# Altium schematic symbol library SiPAP_Parts_v2.SchLib: 40 symbols
Pins are listed as number, name and electrical type; pins without a type are passive.

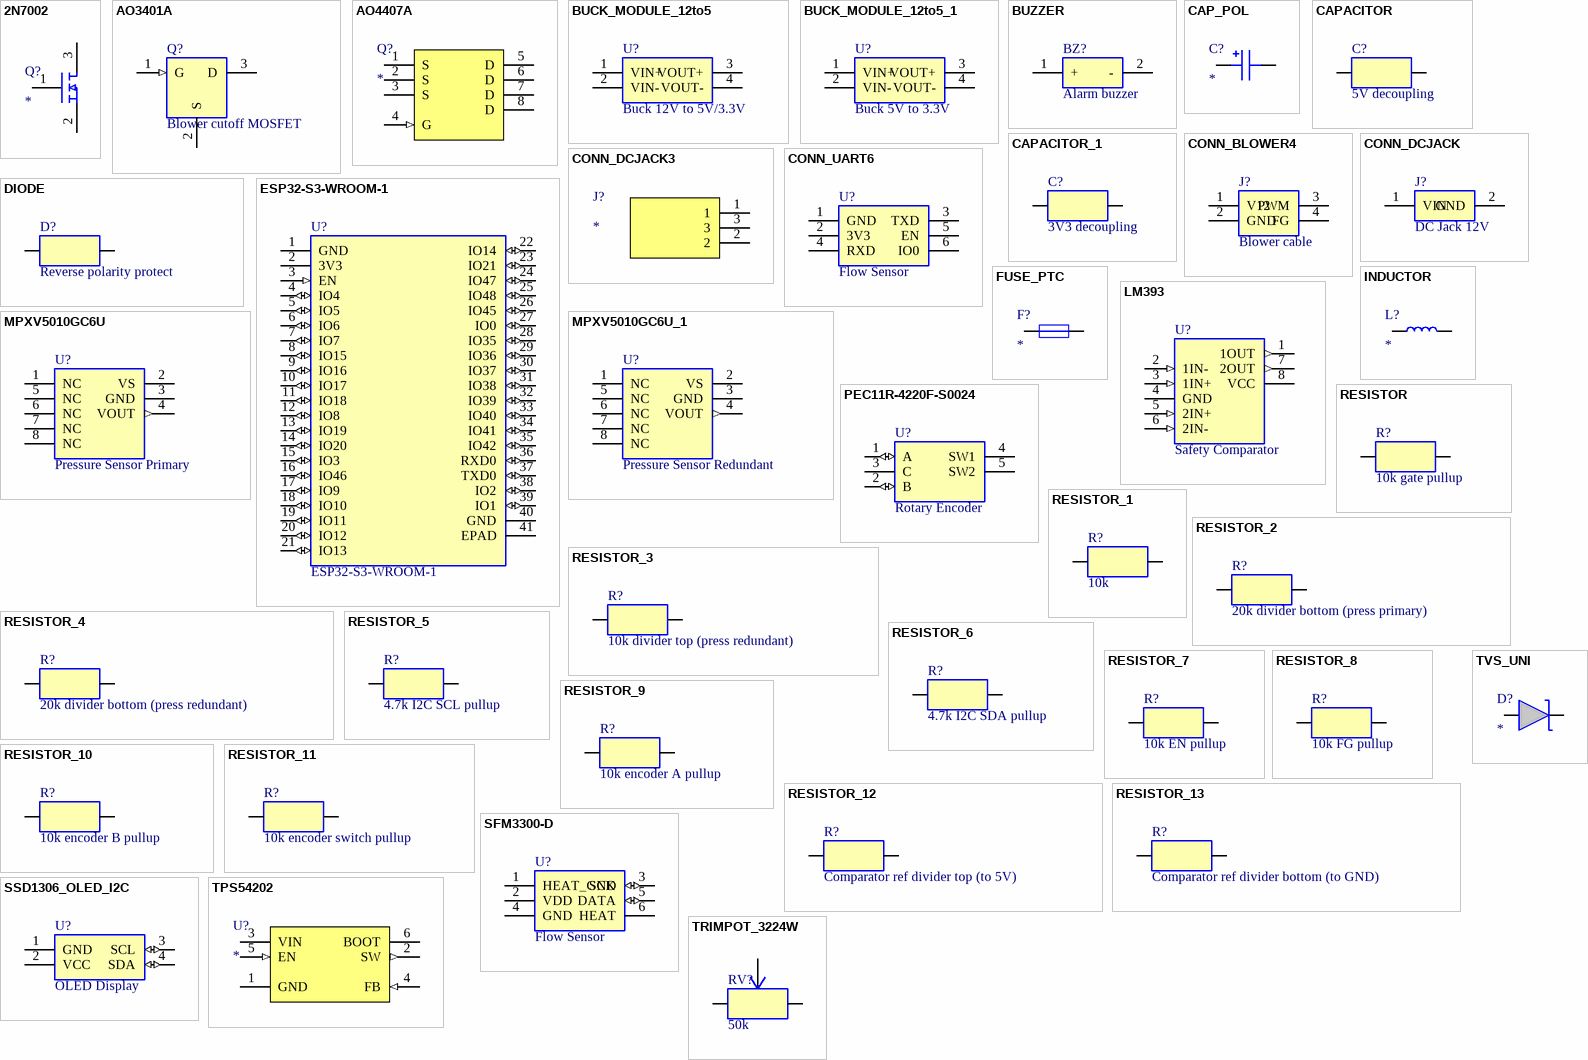
[diagram p0: symbols 2N7002 to TVS_UNI]

## 2N7002
designator Q?
N-channel MOSFET 60V 0.2A SOT-23 (Diodes 2N7002 DS11303 p1: 1=G 2=S 3=D)
footprint SOT-23
pins: 1 G, 2 S, 3 D

## AO3401A
designator Q?, comment Blower cutoff MOSFET
Alpha&Omega AO3401A P-channel MOSFET, SOT-23 (AOS datasheet)
footprint SOT-23
pins: 1 G (in), 2 S, 3 D

## AO4407A
designator Q?
AOS AO4407A P-channel MOSFET -30V -12A, SOIC-8 (S=1,2,3 G=4 D=5-8, datasheet Rev 11.1 p1 top view)
footprint SOIC-8
pins: 1 S, 2 S, 3 S, 4 G (in), 5 D, 6 D, 7 D, 8 D

## BUCK_MODULE_12to5
designator U?, comment Buck 12V to 5V/3.3V
Generic DC-DC buck converter module (e.g. MP1584EN based), 4-pin VIN/VOUT
footprint CONN_HEADER_4
pins: 1 VIN+ (power), 2 VIN- (power), 3 VOUT+ (power), 4 VOUT- (power)

## BUCK_MODULE_12to5_1
designator U?, comment Buck 5V to 3.3V
Generic DC-DC buck converter module (e.g. MP1584EN based), 4-pin VIN/VOUT
footprint CONN_HEADER_4
pins: 1 VIN+ (power), 2 VIN- (power), 3 VOUT+ (power), 4 VOUT- (power)

## BUZZER
designator BZ?, comment Alarm buzzer
Generic piezo buzzer, 2-pin
footprint BUZZER_TDK_PS1240
pins: 1 +, 2 -

## CAP_POL
designator C?
Polarized capacitor (aluminium electrolytic), pin 1 = +
footprint CAP_RAD_D8_P3.5
pins: 1, 2

## CAPACITOR
designator C?, comment 5V decoupling
Generic capacitor, 2-pin
footprint R_0805
pins: 1, 2

## CAPACITOR_1
designator C?, comment 3V3 decoupling
Generic capacitor, 2-pin
footprint R_0805
pins: 1, 2

## CONN_BLOWER4
designator J?, comment Blower cable
4-pin blower cable connector: 12V, GND, PWM, FG
footprint CONN_HEADER_4_2X2
pins: 1 V12, 2 GND, 3 PWM, 4 FG

## CONN_DCJACK
designator J?, comment DC Jack 12V
DC barrel jack 5.5x2.1mm, 2-pin (VIN, GND)
footprint DCJACK_THT_2PIN
pins: 1 VIN, 2 GND

## CONN_DCJACK3
designator J?
DC power jack 3-pin (Same Sky PJ-102AH): 1 centre pin (+), 2 sleeve, 3 switch
footprint CUI_PJ-102AH
pins: 1, 2, 3

## CONN_UART6
designator U?, comment Flow Sensor
6-pin 2.54mm programming header (USB-UART): GND 3V3 TXD RXD EN IO0
footprint CONN_HEADER_6
pins: 1 GND, 2 3V3, 3 TXD, 4 RXD, 5 EN, 6 IO0

## DIODE
designator D?, comment Reverse polarity protect
Generic diode, 2-pin (A=anode, K=cathode)
footprint DIOM_SMC_DO-214AB
pins: 1 A, 2 K

## ESP32-S3-WROOM-1
designator U?
Espressif ESP32-S3-WROOM-1 WiFi+BLE module, 41 pins (datasheet v1.8)
footprint ESP32-S3-WROOM-1_DS
pins: 1 GND (power), 2 3V3 (power), 3 EN (in), 4 IO4 (io), 5 IO5 (io), 6 IO6 (io), 7 IO7 (io), 8 IO15 (io), 9 IO16 (io), 10 IO17 (io), 11 IO18 (io), 12 IO8 (io), 13 IO19 (io), 14 IO20 (io), 15 IO3 (io), 16 IO46 (io), 17 IO9 (io), 18 IO10 (io), 19 IO11 (io), 20 IO12 (io), 21 IO13 (io), 22 IO14 (io), 23 IO21 (io), 24 IO47 (io), 25 IO48 (io), 26 IO45 (io), 27 IO0 (io), 28 IO35 (io), 29 IO36 (io), 30 IO37 (io), 31 IO38 (io), 32 IO39 (io), 33 IO40 (io), 34 IO41 (io), 35 IO42 (io), 36 RXD0 (io), 37 TXD0 (io), 38 IO2 (io), 39 IO1 (io), 40 GND (power), 41 EPAD (power)

## FUSE_PTC
designator F?
Resettable PTC fuse (Bourns MF-R300)
footprint PTC_RADIAL_MF-R300
pins: 1, 2

## INDUCTOR
designator L?
Power inductor (Bourns SRN6045TA)
footprint IND_BOURNS_SRN6045TA
pins: 1, 2

## LM393
designator U?, comment Safety Comparator
Dual comparator, DIP-8/SOIC-8 (TI datasheet SLCS006)
footprint SOIC-8
pins: 1 1OUT (out), 2 1IN- (in), 3 1IN+ (in), 4 GND (power), 5 2IN+ (in), 6 2IN- (in), 7 2OUT (out), 8 VCC (power)

## MPXV5010GC6U
designator U?, comment Pressure Sensor Primary
NXP/Motorola MPXV5010GC6U pressure sensor, SOP-8 (Case 482A), 0-10kPa analog output
footprint MPXV5010GC6U_482A
pins: 1 NC, 2 VS (power), 3 GND (power), 4 VOUT (out), 5 NC, 6 NC, 7 NC, 8 NC

## MPXV5010GC6U_1
designator U?, comment Pressure Sensor Redundant
NXP/Motorola MPXV5010GC6U pressure sensor, SOP-8 (Case 482A), 0-10kPa analog output
footprint MPXV5010GC6U_482A
pins: 1 NC, 2 VS (power), 3 GND (power), 4 VOUT (out), 5 NC, 6 NC, 7 NC, 8 NC

## PEC11R-4220F-S0024
designator U?, comment Rotary Encoder
Bourns PEC11R rotary encoder w/ push switch, 5 terminals (Bourns datasheet Rev 04/26)
footprint PEC11R-4220F-S0024
pins: 1 A (io), 2 B (io), 3 C, 4 SW1, 5 SW2

## RESISTOR
designator R?, comment 10k gate pullup
Generic resistor, 2-pin
footprint R_0805
pins: 1, 2

## RESISTOR_1
designator R?, comment 10k
Generic resistor, 2-pin
footprint R_0805
pins: 1, 2

## RESISTOR_2
designator R?, comment 20k divider bottom (press primary)
Generic resistor, 2-pin
footprint R_0805
pins: 1, 2

## RESISTOR_3
designator R?, comment 10k divider top (press redundant)
Generic resistor, 2-pin
footprint R_0805
pins: 1, 2

## RESISTOR_4
designator R?, comment 20k divider bottom (press redundant)
Generic resistor, 2-pin
footprint R_0805
pins: 1, 2

## RESISTOR_5
designator R?, comment 4.7k I2C SCL pullup
Generic resistor, 2-pin
footprint R_0805
pins: 1, 2

## RESISTOR_6
designator R?, comment 4.7k I2C SDA pullup
Generic resistor, 2-pin
footprint R_0805
pins: 1, 2

## RESISTOR_7
designator R?, comment 10k EN pullup
Generic resistor, 2-pin
footprint R_0805
pins: 1, 2

## RESISTOR_8
designator R?, comment 10k FG pullup
Generic resistor, 2-pin
footprint R_0805
pins: 1, 2

## RESISTOR_9
designator R?, comment 10k encoder A pullup
Generic resistor, 2-pin
footprint R_0805
pins: 1, 2

## RESISTOR_10
designator R?, comment 10k encoder B pullup
Generic resistor, 2-pin
footprint R_0805
pins: 1, 2

## RESISTOR_11
designator R?, comment 10k encoder switch pullup
Generic resistor, 2-pin
footprint R_0805
pins: 1, 2

## RESISTOR_12
designator R?, comment Comparator ref divider top (to 5V)
Generic resistor, 2-pin
footprint R_0805
pins: 1, 2

## RESISTOR_13
designator R?, comment Comparator ref divider bottom (to GND)
Generic resistor, 2-pin
footprint R_0805
pins: 1, 2

## SFM3300-D
designator U?, comment Flow Sensor
Sensirion SFM3300-D digital flow meter, I2C addr 0x40, 6-pad connector (Datasheet D1 v1.4)
footprint CONN_HEADER_6
pins: 1 HEAT_GND (power), 2 VDD (power), 3 SCK (io), 4 GND (power), 5 DATA (io), 6 HEAT

## SSD1306_OLED_I2C
designator U?, comment OLED Display
0.96in 128x64 I2C OLED module, 4-pin (GND,VCC,SCL,SDA), addr 0x3C
footprint CONN_HEADER_4
pins: 1 GND (power), 2 VCC (power), 3 SCL (io), 4 SDA (io)

## TPS54202
designator U?
TI TPS54202 4.5-28V 2A synchronous buck, SOT-23-6 (DDC)
footprint TI_DDC0006A_SOT23-6
pins: 1 GND (power), 2 SW (out), 3 VIN (power), 4 FB (in), 5 EN (in), 6 BOOT

## TRIMPOT_3224W
designator RV?, comment 50k
Bourns 3224W trimmer, top adjust (Bourns 3224 DS p.1: 1 = CCW end, 2 = wiper, 3 = CW end)
footprint BOURNS_3224W
pins: 1 CCW, 2 W, 3 CW

## TVS_UNI
designator D?
Unidirectional TVS (Bourns SMBJ15A), pin1 = cathode
footprint DIOM_SMB_DO-214AA_BOURNS
pins: 1 K, 2 A